# Altium footprint library Cole_.PcbLib: 175 footprints (part 4 of 11)
Each footprint in its own frame and in the unit in brackets; x right, y up, seen from the top. Pads: shape width x height; smd on the part's side, far side on the other; paste and mask are expansions set on the pad; w line width, h text height; cw(c..) or ccw(c..) is an arc to the next point about the centre after c.
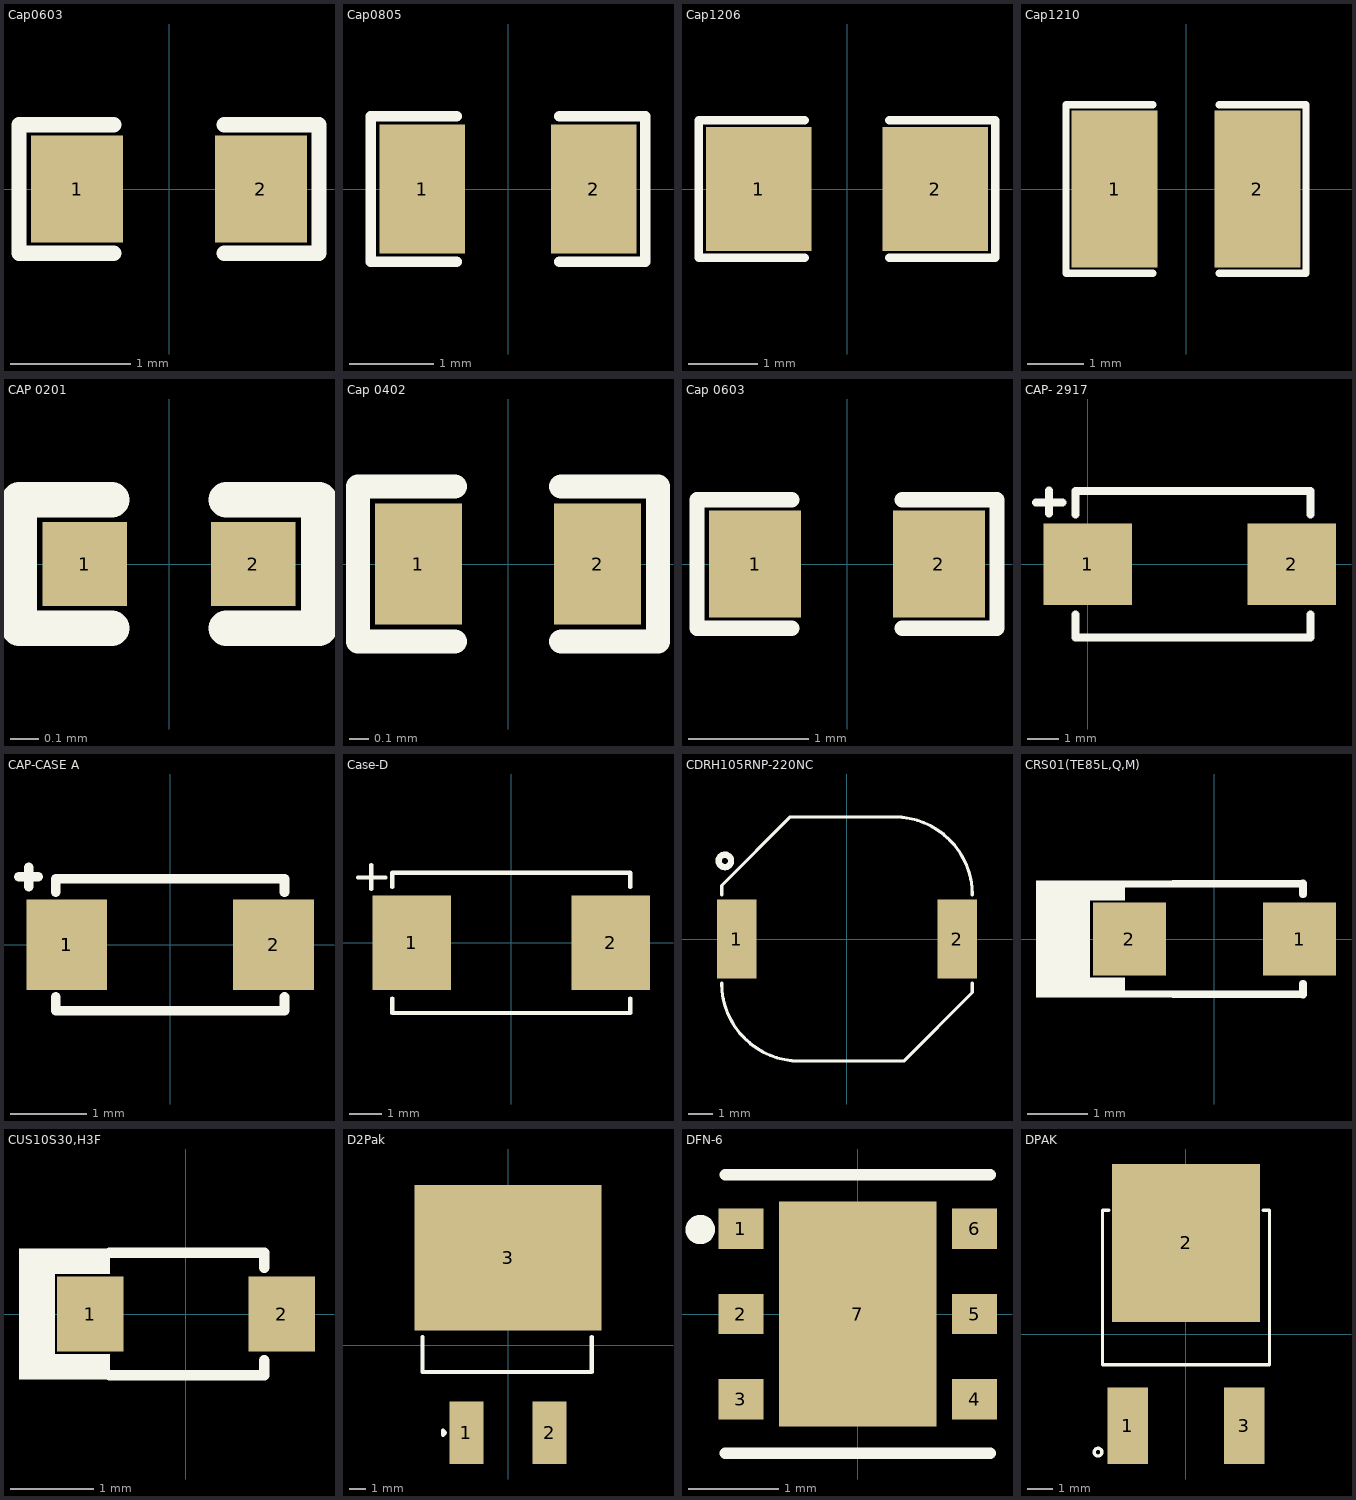
[diagram p3: the footprints below, top view; thin cyan lines are the x and y axes]

## Cap0603 [mil]
pads (2):
  rect 30x35 smd mask+2.36: 1(-30,0) 2(30,0)
Top Overlay:
  lines w5: -18,-21 -49,-21 -49,21 -18,21 ; 18,-21 49,-21 49,21 18,21
3D body "User Library-CAPC1608X09.step": height 34.25, standoff -1.18, extent -31.51,-15.75 31.49,15.74

## Cap0805 [mil] "SMD 0805"
pads (2):
  rect 40x60 smd mask+2.76: 1(-40,0) 2(40,0)
Top Overlay:
  lines w5: -24,-34 -64,-34 -64,34 -24,34 ; 24,-34 64,-34 64,34 24,34
3D body "User Library-0805 SMD Capacitor.step": height 30, standoff -0.79, extent -39.36,-24.6 39.38,24.61

## Cap1206 [mil] "SMD 1206"
pads (2):
  rect 60x70 smd: 1(-50,0) 2(50,0)
Top Overlay:
  lines w5: -24,-39 -84,-39 -84,39 -24,39 ; 24,-39 84,-39 84,39 24,39
3D body "User Library-1206 SMD Capacitor.step": height 39.45, standoff 0, extent -62.96,-31.46 63.03,31.53

## Cap1210 [mil] "SMD 1210"
pads (2):
  rect 60x110 smd: 1(-50,0) 2(50,0)
Top Overlay:
  lines w5: -23,-59 -84,-59 -84,59 -23,59 ; 23,-59 84,-59 84,59 23,59
3D body "User Library-CAPC3225X10.step": height 39.37, standoff 0, extent -62.99,-49.21 63,49.22

## CAP 0201 [mm]
pads (2):
  rect 0.3x0.3 smd mask+0.055: 1(-0.3,0) 2(0.3,0)
Top Overlay:
  lines w0.127: -0.203,-0.229 -0.533,-0.229 -0.533,0.229 -0.203,0.229 ; 0.203,-0.229 0.533,-0.229 0.533,0.229 0.203,0.229
3D body "User Library-SMD Ceramic Capacitors_0201 (0603)_AB.STEP": height 0.28, standoff -0.02, extent -0.3,-0.15 0.301,0.15

## Cap 0402 [mil]
pads (2):
  rect 18x25 smd mask+2.36: 1(-18.5,0) 2(18.5,0)
Top Overlay:
  lines w5: -11,-16 -31,-16 -31,16 -11,16 ; 11,-16 31,-16 31,16 11,16
3D body "User Library-Capacitor 0402.step": height 18.5, standoff -1.18, extent -19.68,-9.84 19.7,9.85

## Cap 0603 [mil]
pads (2):
  rect 30x35 smd mask+2.36: 1(-30,0) 2(30,0)
Top Overlay:
  lines w5: -18,-21 -49,-21 -49,21 -18,21 ; 18,-21 49,-21 49,21 18,21
3D body "User Library-CAPC1608X09.step": height 34.25, standoff -1.18, extent -31.51,-15.75 31.49,15.74

## CAP- 2917 [mm]
pads (2):
  rect 2.79x2.57 smd: 1(0,0) 2(6.44,0)
Top Overlay:
  lines w0.254: -1.631,1.956 -0.793,1.956 ; -1.225,1.6 -1.225,2.337 ; -0.387,-1.575 -0.387,-2.311 7.03,-2.311 7.03,-1.575 ; -0.387,1.575 -0.387,2.311 7.03,2.311 7.03,1.575
3D body "593D D-CASE.stp": height 2.88, standoff -0.04, extent -0.273,-2.207 6.916,2.21

## CAP-CASE A [mm]
pads (3):
  rect 1.06x1.19 smd: 1(-1.355,0) 1(-1.355,0) 2(1.355,0)
Top Overlay:
  lines w0.127: -1.981,0.889 -1.727,0.889 ; -1.853,0.76 -1.853,1.014 ; -1.499,-0.686 -1.499,-0.864 1.499,-0.864 1.499,-0.686 ; -1.499,0.686 -1.499,0.864 1.499,0.864 1.499,0.686
3D body "TAJA104K035RNJ.STEP": height 1.8, standoff 0, extent -1.6,-0.8 1.6,0.8

## Case-D [mm]
pads (2):
  rect 2.4x2.9 smd: 1(-3.05,0) 2(3.05,0)
Top Overlay:
  lines w0.127: -4.699,2.007 -3.861,2.007 ; -4.293,1.651 -4.293,2.388 ; -3.65,-1.709 -3.65,-2.15 3.65,-2.15 3.65,-1.709 ; -3.65,1.709 -3.65,2.15 3.65,2.15 3.65,1.709
3D body "6tpe680mi.stp": height 4, standoff 0, extent -3.65,-2.159 3.65,2.141

## CDRH105RNP-220NC [mm]
pads (2):
  rect 1.6x3.2 smd: 1(-4.45,0) 2(4.45,0)
Top Overlay:
  circle w0.254: c-4.928,3.15 r0.251
  lines w0.127: -5.055,-1.782 ccw(c-1.909,-1.782) -1.909,-4.928 2.286,-4.928 5.055,-2.159 5.055,-1.782 ; -5.055,1.782 -5.055,2.159 -2.286,4.928 1.909,4.928 cw(c1.909,1.782) 5.055,1.782
3D body "User Library-CDRH10D60BT150.STEP": height 6.29, standoff 0.24, extent -5.014,-4.826 5.065,4.874

## CRS01(TE85L,Q,M) [mm] "DIODE SCHOTTKY 30V 1A SOD123F"
pads (2):
  rect 1.2x1.2 smd: 1(1.4,0) 2(-1.4,0)
Top Overlay:
  rectangle: -2.175,0.635 -1.473,0.924
  rectangle: -2.175,-0.924 -1.473,-0.635
  rectangle: -2.937,-0.965 -2.048,0.965
  lines w0.127: -2.86,-0.899 1.458,-0.914 1.458,-0.737 ; -2.86,0.899 1.458,0.914 1.458,0.737
3D body "User Library-SOD-123F.step": height 1.02, standoff 0, extent -1.9,-0.9 1.9,0.9

## CUS10S30,H3F [mm]
pads (2):
  rect 0.8x0.9 smd mask+0.055: 1(-1.15,0) 2(1.15,0)
Top Overlay:
  rectangle: -2.007,-0.508 -1.575,0.508
  rectangle: -2.007,-0.787 -0.914,-0.483
  rectangle: -2.007,0.483 -0.914,0.787
  lines w0.127: -0.914,-0.737 0.94,-0.737 0.94,-0.559 ; -0.914,0.737 0.94,0.737 0.94,0.559
3D body "User Library-SOD323-1.step": height 1.1, standoff 0, extent -1.3,-0.675 1.3,0.675

## D2Pak [mm]
pads (3):
  rect 2.08x3.81 smd: 1(-2.54,-5.335) 2(2.54,-5.335)
  rect 11.43x8.89 smd: 3(0,5.335)
Top Overlay:
  lines w0.254: -5.207,0.508 -5.207,-1.626 5.105,-1.626 5.105,0.508 ; -3.962,-5.461 -3.835,-5.334 -3.962,-5.207 -3.962,-5.461
3D body "pwr263s-35-8r20f.stp": height 4.5, standoff 0, extent -5.075,-6.596 5.025,8.794

## DFN-6 [mm]
pads (7):
  rect 0.5x0.45 smd mask+0.055: 1(-1.3,0.95) 2(-1.3,0) 3(-1.3,-0.95) 4(1.3,-0.95) 5(1.3,0) 6(1.3,0.95)
  rect 1.75x2.5 smd mask+0.055: 7(0,0)
Top Overlay:
  circle w0.254: c-1.753,0.94 r0.036
  lines w0.127: -1.473,-1.549 1.473,-1.549 ; -1.473,1.549 1.473,1.549
3D body "LD39050PU33R.STEP": height 0.96, standoff -0.04, extent -1.5,-1.5 1.5,1.5

## DPAK [mm]
pads (3):
  rect 1.6x3 smd: 1(-2.285,-3.59) 3(2.285,-3.59)
  rect 5.8x6.2 smd: 2(0,3.59)
Top Overlay:
  circle w0.127: c-3.454,-4.623 r0.152
  lines w0.127: -3.023,4.877 -3.277,4.877 -3.277,-1.194 3.277,-1.194 3.277,4.877 3.023,4.877
3D body "MC7805BDTRKG.STEP": height 2.51, standoff -0.01, extent -3.277,-3.988 3.223,5.918